# Altium footprint library PCB1.PcbLib: 53 footprints (part 1 of 4)
Each footprint in its own frame and in the unit in brackets; x right, y up, seen from the top. Pads: shape width x height; smd on the part's side, far side on the other; paste and mask are expansions set on the pad; w line width, h text height; cw(c..) or ccw(c..) is an arc to the next point about the centre after c.
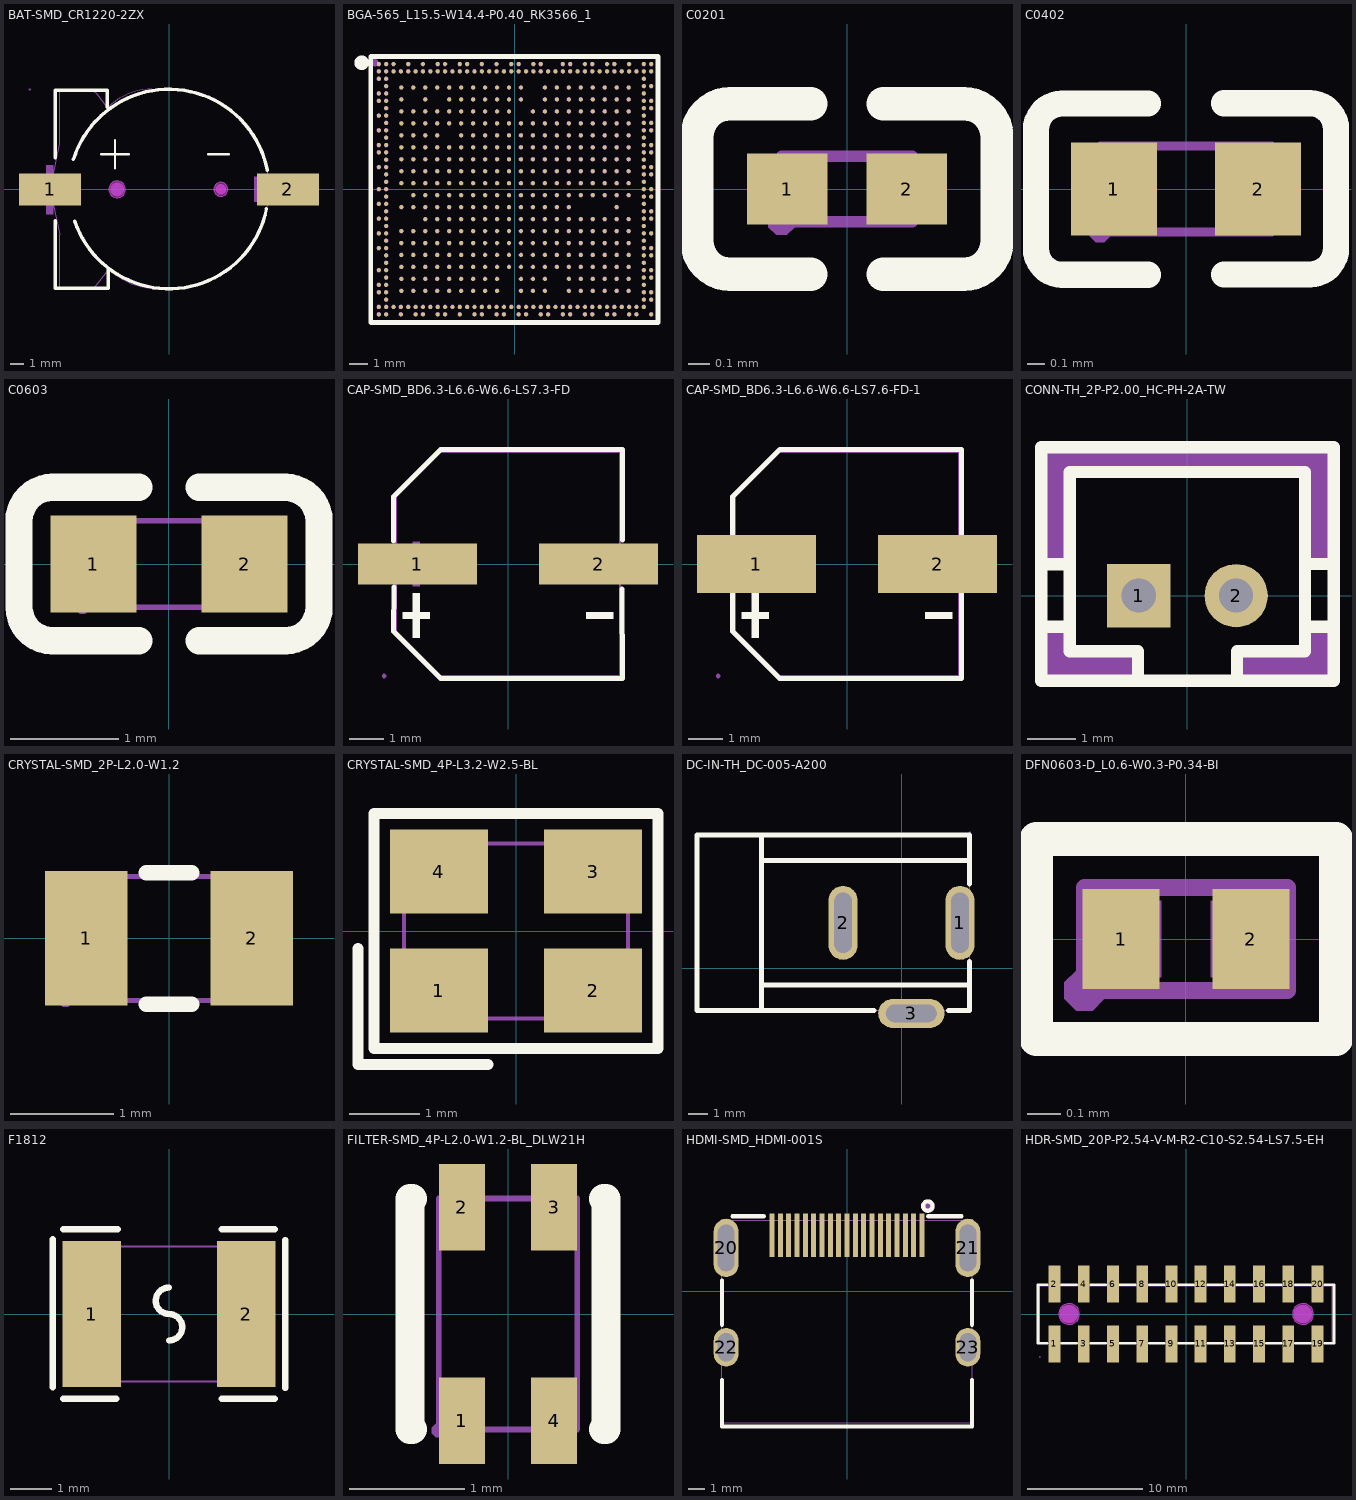
[diagram p0: the footprints below, top view; thin cyan lines are the x and y axes]

## BAT-SMD_CR1220-2ZX [mm]
pads (2):
  rect 4.5x2.3 smd: 1(-8.6,0) 2(8.6,0)
Top Overlay:
  lines w0.152: -4.928,2.54 -2.896,2.54 ; -3.912,1.524 -3.912,3.556 ; 2.819,2.54 4.343,2.54
  lines w0.254: -8.24,-2.26 -8.24,-7.15 -4.4,-7.15 -4.4,-5.706 -4.378,-5.706 ; -8.24,2.3 -8.24,7.17 -5.51,7.17 -4.47,7.17 -4.47,5.95 ; -6.911,2.175 cw(c0,0) 7.109,1.399 ; -6.815,-2.297 ccw(c0,0) 7.051,-1.418
Keep-Out Layer:
  board cut-out: 4.25,0 4.25,-0.099 4.174,-0.283 4.033,-0.424 3.85,-0.5 3.651,-0.5 3.467,-0.424 3.326,-0.283 3.25,-0.099 3.25,0 3.25,0.099 3.326,0.283 3.467,0.424 3.651,0.5 3.85,0.5 4.033,0.424 4.174,0.283 4.25,0.099 4.25,0
  board cut-out: -3.15,0 -3.15,-0.119 -3.241,-0.34 -3.41,-0.509 -3.631,-0.6 -3.869,-0.6 -4.09,-0.509 -4.259,-0.34 -4.35,-0.119 -4.35,0 -4.35,0.119 -4.259,0.34 -4.09,0.509 -3.869,0.6 -3.631,0.6 -3.41,0.509 -3.241,0.34 -3.15,0.119 -3.15,0
Keep-Out Layer:
  circle w0.003: c3.75,0 r0.5
  circle w0.003: c-3.75,0 r0.6
  region: 4.25,0 4.25,-0.099 4.174,-0.283 4.033,-0.424 3.85,-0.5 3.651,-0.5 3.467,-0.424 3.326,-0.283 3.25,-0.099 3.25,0 3.25,0.099 3.326,0.283 3.467,0.424 3.651,0.5 3.85,0.5 4.033,0.424 4.174,0.283 4.25,0.099 4.25,0
  region: 4.25,0 4.24,-0.098 4.212,-0.191 4.166,-0.278 4.104,-0.354 4.028,-0.416 3.941,-0.462 3.848,-0.49 3.75,-0.5 3.653,-0.49 3.559,-0.462 3.472,-0.416 3.397,-0.354 3.334,-0.278 3.288,-0.191 3.26,-0.098 3.25,0 3.26,0.098 3.288,0.191 3.334,0.278 3.397,0.354 3.472,0.416 3.559,0.462 3.653,0.49 3.75,0.5 3.848,0.49 3.941,0.462 4.028,0.416 4.104,0.354 4.166,0.278 4.212,0.191 4.24,0.098
  region: -3.15,0 -3.15,-0.119 -3.241,-0.34 -3.41,-0.509 -3.631,-0.6 -3.869,-0.6 -4.09,-0.509 -4.259,-0.34 -4.35,-0.119 -4.35,0 -4.35,0.119 -4.259,0.34 -4.09,0.509 -3.869,0.6 -3.631,0.6 -3.41,0.509 -3.241,0.34 -3.15,0.119 -3.15,0
  region: -3.15,0 -3.159,-0.104 -3.186,-0.205 -3.23,-0.3 -3.29,-0.386 -3.364,-0.46 -3.45,-0.52 -3.545,-0.564 -3.646,-0.591 -3.75,-0.6 -3.854,-0.591 -3.955,-0.564 -4.05,-0.52 -4.136,-0.46 -4.21,-0.386 -4.27,-0.3 -4.314,-0.205 -4.341,-0.104 -4.35,0 -4.341,0.104 -4.314,0.205 -4.27,0.3 -4.21,0.386 -4.136,0.46 -4.05,0.52 -3.955,0.564 -3.854,0.591 -3.75,0.6 -3.646,0.591 -3.545,0.564 -3.45,0.52 -3.364,0.46 -3.29,0.386 -3.23,0.3 -3.186,0.205 -3.159,0.104
Mechanical 1:
  circle w0.003: c3.75,0 r0.5
  circle w0.003: c-3.75,0 r0.6
Mechanical 6:
  drawing of 9 lines, arcs and shapes, not listed
Mechanical 7:
  lines w0.051: -8.382,-1.016 -8.382,1.016 -7.89,3.3 -7.89,7.15 -5.47,7.15 -5.2,6.88 -4.47,5.92 -4.43,5.92 cw(c-1.232,2.722) -1.232,7.245 0.081,7.245 cw(c0.081,0.08) 7.245,0.08 7.245,0 cw(c0.053,0) 0.053,-7.192 0,-7.192 -0.843,-7.192 cw(c-0.843,-2.281) -4.315,-5.754 -5.26,-6.93 -5.48,-7.15 -7.89,-7.15 -7.89,-3.3 -8.38,-1.07 -8.382,-1.016
Mechanical 8:
  region: -10.01,7.215 -10.01,7.19 -10.045,7.155 -10.095,7.155 -10.13,7.19 -10.13,7.215 -10.13,7.24 -10.095,7.275 -10.045,7.275 -10.01,7.24 -10.01,7.215
Mechanical 9:
  region: -6.57,-0.9 -10.07,-0.9 -10.07,0.9 -6.57,0.9
  region: 6.17,0.9 9.67,0.9 9.67,-0.9 6.17,-0.9
3D body "C7498147.step": height 4.05, standoff -0.85, extent -9.416,-7.45 10.34,7.45

## BGA-565_L15.5-W14.4-P0.40_RK3566_1 [mm]
pads (565):
  round 0.22 smd: 1A1(-6.175,5.525) 1A2(-5.525,5.525) 1A3(-4.875,5.525) 1A4(-4.225,5.525) 1A5(-3.575,5.525) 1A6(-2.925,5.525) 1A7(-2.275,5.525) 1A8(-1.625,5.525) 1A9(-0.975,5.525) 1A10(-0.325,5.525) 1A11(0.325,5.525) 1A13(1.625,5.525) 1A14(2.275,5.525) 1A15(2.925,5.525) 1A16(3.575,5.525) 1A17(4.225,5.525) 1A18(4.875,5.525) 1A19(5.525,5.525) 1A20(6.175,5.525) 1B1(-6.175,4.875) 1B3(-4.875,4.875) 1B5(-3.575,4.875) 1B6(-2.925,4.875) 1B7(-2.275,4.875) 1B8(-1.625,4.875) 1B9(-0.975,4.875) 1B10(-0.325,4.875) 1B11(0.325,4.875) 1B13(1.625,4.875) 1B14(2.275,4.875) 1B15(2.925,4.875) 1B16(3.575,4.875) 1B17(4.225,4.875) 1B18(4.875,4.875) 1B19(5.525,4.875) 1B20(6.175,4.875) 1C1(-6.175,4.225) 1C2(-5.525,4.225) 1C3(-4.875,4.225) 1C4(-4.225,4.225) 1C5(-3.575,4.225) 1C6(-2.925,4.225) 1C7(-2.275,4.225) 1C8(-1.625,4.225) 1C9(-0.975,4.225) 1C10(-0.325,4.225) 1C12(0.975,4.225) 1C13(1.625,4.225) 1C14(2.275,4.225) 1C15(2.925,4.225) 1C16(3.575,4.225) 1C17(4.225,4.225) 1C18(4.875,4.225) 1C19(5.525,4.225) 1C20(6.175,4.225) 1D1(-6.175,3.575) 1D2(-5.525,3.575) 1D3(-4.875,3.575) 1D4(-4.225,3.575) 1D5(-3.575,3.575) 1D6(-2.925,3.575) 1D7(-2.275,3.575) 1D8(-1.625,3.575) 1D9(-0.975,3.575) 1D10(-0.325,3.575) 1D11(0.325,3.575) 1D12(0.975,3.575) 1D13(1.625,3.575) 1D14(2.275,3.575) 1D15(2.925,3.575) 1D16(3.575,3.575) 1D17(4.225,3.575) 1D18(4.875,3.575) 1D19(5.525,3.575) 1D20(6.175,3.575) 1E1(-6.175,2.925) 1E2(-5.525,2.925) 1E3(-4.875,2.925) 1E4(-4.225,2.925) 1E6(-2.925,2.925) 1E7(-2.275,2.925) 1E8(-1.625,2.925) 1E9(-0.975,2.925) 1E10(-0.325,2.925) 1E11(0.325,2.925) 1E12(0.975,2.925) 1E13(1.625,2.925) 1E14(2.275,2.925) 1E15(2.925,2.925) 1E16(3.575,2.925) 1E17(4.225,2.925) 1E18(4.875,2.925) 1E19(5.525,2.925) 1E20(6.175,2.925) 1F1(-6.175,2.275) 1F2(-5.525,2.275) 1F3(-4.875,2.275) 1F4(-4.225,2.275) 1F5(-3.575,2.275) 1F6(-2.925,2.275) 1F7(-2.275,2.275) 1F8(-1.625,2.275) 1F9(-0.975,2.275) 1F10(-0.325,2.275) 1F11(0.325,2.275) 1F12(0.975,2.275) 1F13(1.625,2.275) 1F14(2.275,2.275) 1F15(2.925,2.275) 1F16(3.575,2.275) 1F17(4.225,2.275) 1F18(4.875,2.275) 1F19(5.525,2.275) 1F20(6.175,2.275) 1G1(-6.175,1.625) 1G2(-5.525,1.625) 1G3(-4.875,1.625) 1G4(-4.225,1.625) 1G5(-3.575,1.625) 1G6(-2.925,1.625) 1G7(-2.275,1.625) 1G8(-1.625,1.625) 1G9(-0.975,1.625) 1G10(-0.325,1.625) 1G11(0.325,1.625) 1G12(0.975,1.625) 1G13(1.625,1.625) 1G14(2.275,1.625) 1G15(2.925,1.625) 1G16(3.575,1.625) 1G17(4.225,1.625) 1G18(4.875,1.625) 1G19(5.525,1.625) 1G20(6.175,1.625) 1H1(-6.175,0.975) 1H2(-5.525,0.975) 1H3(-4.875,0.975) 1H4(-4.225,0.975) 1H5(-3.575,0.975) 1H6(-2.925,0.975) 1H7(-2.275,0.975) 1H8(-1.625,0.975) 1H9(-0.975,0.975) 1H10(-0.325,0.975) 1H11(0.325,0.975) 1H12(0.975,0.975) 1H13(1.625,0.975) 1H14(2.275,0.975) 1H15(2.925,0.975) 1H16(3.575,0.975) 1H17(4.225,0.975) 1H18(4.875,0.975) 1H19(5.525,0.975) 1H20(6.175,0.975) 1J1(-6.175,0.325) 1J2(-5.525,0.325) 1J3(-4.875,0.325) 1J4(-4.225,0.325) 1J5(-3.575,0.325) 1J6(-2.925,0.325) 1J7(-2.275,0.325) 1J8(-1.625,0.325) 1J9(-0.975,0.325) 1J10(-0.325,0.325) 1J11(0.325,0.325) 1J12(0.975,0.325) 1J13(1.625,0.325) 1J14(2.275,0.325) 1J15(2.925,0.325) 1J16(3.575,0.325) 1J17(4.225,0.325) 1J18(4.875,0.325) 1J19(5.525,0.325) 1J20(6.175,0.325) 1K2(-5.525,-0.325) 1K3(-4.875,-0.325) 1K4(-4.225,-0.325) 1K5(-3.575,-0.325) 1K6(-2.925,-0.325) 1K7(-2.275,-0.325) 1K8(-1.625,-0.325) 1K9(-0.975,-0.325) 1K10(-0.325,-0.325) 1K11(0.325,-0.325) 1K12(0.975,-0.325) 1K13(1.625,-0.325) 1K14(2.275,-0.325) 1K15(2.925,-0.325) 1K16(3.575,-0.325) 1K17(4.225,-0.325) 1K18(4.875,-0.325) 1K19(5.525,-0.325) 1K20(6.175,-0.325) 1L1(-6.175,-0.975) 1L2(-5.525,-0.975) 1L3(-4.875,-0.975) 1L4(-4.225,-0.975) 1L5(-3.575,-0.975) 1L6(-2.925,-0.975) 1L7(-2.275,-0.975) 1L8(-1.625,-0.975) 1L9(-0.975,-0.975) 1L10(-0.325,-0.975) 1L11(0.325,-0.975) 1L12(0.975,-0.975) 1L13(1.625,-0.975) 1L14(2.275,-0.975) 1L15(2.925,-0.975) 1L19(5.525,-0.975) 1M3(-4.875,-1.625) 1M4(-4.225,-1.625) 1M5(-3.575,-1.625) 1M6(-2.925,-1.625) 1M7(-2.275,-1.625) 1M8(-1.625,-1.625) 1M9(-0.975,-1.625) 1M10(-0.325,-1.625) 1M11(0.325,-1.625) 1M12(0.975,-1.625) 1M13(1.625,-1.625) 1M14(2.275,-1.625) 1M15(2.925,-1.625) 1M16(3.575,-1.625) 1M17(4.225,-1.625) 1M18(4.875,-1.625) 1M19(5.525,-1.625) 1M20(6.175,-1.625) 1N1(-6.175,-2.275) 1N2(-5.525,-2.275) 1N3(-4.875,-2.275) 1N4(-4.225,-2.275) 1N5(-3.575,-2.275) 1N6(-2.925,-2.275) 1N7(-2.275,-2.275) 1N8(-1.625,-2.275) 1N9(-0.975,-2.275) 1N10(-0.325,-2.275) 1N11(0.325,-2.275) 1N12(0.975,-2.275) 1N13(1.625,-2.275) 1N14(2.275,-2.275) 1N15(2.925,-2.275) 1N16(3.575,-2.275) 1N17(4.225,-2.275) 1N18(4.875,-2.275) 1N19(5.525,-2.275) 1N20(6.175,-2.275) 1P1(-6.175,-2.925) 1P2(-5.525,-2.925) 1P3(-4.875,-2.925) 1P4(-4.225,-2.925) 1P5(-3.575,-2.925) 1P6(-2.925,-2.925) 1P7(-2.275,-2.925) 1P8(-1.625,-2.925) 1P9(-0.975,-2.925) 1P10(-0.325,-2.925) 1P11(0.325,-2.925) 1P12(0.975,-2.925) 1P13(1.625,-2.925) 1P14(2.275,-2.925) 1P15(2.925,-2.925) 1P16(3.575,-2.925) 1P17(4.225,-2.925) 1P18(4.875,-2.925) 1P19(5.525,-2.925) 1P20(6.175,-2.925) 1R1(-6.175,-3.575) 1R2(-5.525,-3.575) 1R3(-4.875,-3.575) 1R4(-4.225,-3.575) 1R5(-3.575,-3.575) 1R6(-2.925,-3.575) 1R7(-2.275,-3.575) 1R8(-1.625,-3.575) 1R9(-0.975,-3.575) 1R10(-0.325,-3.575) 1R11(0.325,-3.575) 1R12(0.975,-3.575) 1R13(1.625,-3.575) 1R14(2.275,-3.575) 1R15(2.925,-3.575) 1R16(3.575,-3.575) 1R17(4.225,-3.575) 1R18(4.875,-3.575) 1R19(5.525,-3.575) 1R20(6.175,-3.575) 1T1(-6.175,-4.225) 1T2(-5.525,-4.225) 1T3(-4.875,-4.225) 1T4(-4.225,-4.225) 1T5(-3.575,-4.225) 1T6(-2.925,-4.225) 1T7(-2.275,-4.225) 1T8(-1.625,-4.225) 1T9(-0.975,-4.225) 1T10(-0.325,-4.225) 1T11(0.325,-4.225) 1T12(0.975,-4.225) 1T13(1.625,-4.225) 1T14(2.275,-4.225) 1T15(2.925,-4.225) 1T16(3.575,-4.225) 1T17(4.225,-4.225) 1T18(4.875,-4.225) 1T19(5.525,-4.225) 1T20(6.175,-4.225) 1U1(-6.175,-4.875) 1U2(-5.525,-4.875) 1U3(-4.875,-4.875) 1U4(-4.225,-4.875) 1U5(-3.575,-4.875) 1U6(-2.925,-4.875) 1U7(-2.275,-4.875) 1U8(-1.625,-4.875) 1U9(-0.975,-4.875) 1U11(0.325,-4.875) 1U12(0.975,-4.875) 1U13(1.625,-4.875) 1U15(2.925,-4.875) 1U16(3.575,-4.875) 1U17(4.225,-4.875) 1U18(4.875,-4.875) 1U19(5.525,-4.875) 1U20(6.175,-4.875) 1V1(-6.175,-5.525) 1V2(-5.525,-5.525) 1V3(-4.875,-5.525) 1V4(-4.225,-5.525) 1V5(-3.575,-5.525) 1V6(-2.925,-5.525) 1V7(-2.275,-5.525) 1V8(-1.625,-5.525) 1V9(-0.975,-5.525) 1V11(0.325,-5.525) 1V12(0.975,-5.525) 1V13(1.625,-5.525) 1V15(2.925,-5.525) 1V16(3.575,-5.525) 1V17(4.225,-5.525) 1V18(4.875,-5.525) 1V19(5.525,-5.525) 1V20(6.175,-5.525)
  round 0.22 smd paste+0 mask+0.038: A1(-7.4,6.8) A2(-7,6.8) A3(-6.6,6.8) A5(-5.8,6.8) A7(-5,6.8) A9(-4.2,6.8) A10(-3.8,6.8) A12(-3,6.8) A13(-2.6,6.8) A15(-1.8,6.8) A17(-1,6.8) A19(-0.2,6.8) A20(0.2,6.8) A22(1,6.8) A23(1.4,6.8) A26(2.6,6.8) A27(3,6.8) A29(3.8,6.8) A30(4.2,6.8) A32(5,6.8) A33(5.4,6.8) A35(6.2,6.8) A37(7,6.8) A38(7.4,6.8) AA2(-7,-1.2) AA37(7,-1.2) AA38(7.4,-1.2) AB1(-7.4,-1.6) AB2(-7,-1.6) AB37(7,-1.6) AB38(7.4,-1.6) AC2(-7,-2) AC37(7,-2) AD1(-7.4,-2.4) AD2(-7,-2.4) AD37(7,-2.4) AD38(7.4,-2.4) AE2(-7,-2.8) AE37(7,-2.8) AF1(-7.4,-3.2) AF2(-7,-3.2) AF37(7,-3.2) AF38(7.4,-3.2) AG2(-7,-3.6) AG37(7,-3.6) AG38(7.4,-3.6) AH2(-7,-4) AH37(7,-4) AJ1(-7.4,-4.4) AJ2(-7,-4.4) AJ37(7,-4.4) AJ38(7.4,-4.4) AK2(-7,-4.8) AK38(7.4,-4.8) AL1(-7.4,-5.2) AL2(-7,-5.2) AL37(7,-5.2) AM1(-7.4,-5.6) AM2(-7,-5.6) AM37(7,-5.6) AM38(7.4,-5.6) AN2(-7,-6) AN37(7,-6) AN38(7.4,-6) AP1(-7.4,-6.4) AP2(-7,-6.4) AP3(-6.6,-6.4) AP4(-6.2,-6.4) AP5(-5.8,-6.4) AP6(-5.4,-6.4) AP7(-5,-6.4) AP8(-4.6,-6.4) AP9(-4.2,-6.4) AP10(-3.8,-6.4) AP11(-3.4,-6.4) AP12(-3,-6.4) AP13(-2.6,-6.4) AP14(-2.2,-6.4) AP15(-1.8,-6.4) AP16(-1.4,-6.4) AP17(-1,-6.4) AP18(-0.6,-6.4) AP19(-0.2,-6.4) AP20(0.2,-6.4) AP21(0.6,-6.4) AP22(1,-6.4) AP23(1.4,-6.4) AP24(1.8,-6.4) AP25(2.2,-6.4) AP26(2.6,-6.4) AP27(3,-6.4) AP28(3.4,-6.4) AP29(3.8,-6.4) AP30(4.2,-6.4) AP31(4.6,-6.4) AP32(5,-6.4) AP33(5.4,-6.4) AP34(5.8,-6.4) AP35(6.2,-6.4) AP36(6.6,-6.4) AP37(7,-6.4) AR1(-7.4,-6.8) AR2(-7,-6.8) AR4(-6.2,-6.8) AR6(-5.4,-6.8) AR7(-5,-6.8) AR9(-4.2,-6.8) AR10(-3.8,-6.8) AR12(-3,-6.8) AR14(-2.2,-6.8) AR15(-1.8,-6.8) AR17(-1,-6.8) AR18(-0.6,-6.8) AR20(0.2,-6.8) AR21(0.6,-6.8) AR23(1.4,-6.8) AR24(1.8,-6.8) AR26(2.6,-6.8) AR27(3,-6.8) AR29(3.8,-6.8) AR30(4.2,-6.8) AR32(5,-6.8) AR33(5.4,-6.8) AR35(6.2,-6.8) AR36(6.6,-6.8) AR38(7.4,-6.8) B1(-7.4,6.4) B2(-7,6.4) B3(-6.6,6.4) B4(-6.2,6.4) B5(-5.8,6.4) B6(-5.4,6.4) B7(-5,6.4) B8(-4.6,6.4) B9(-4.2,6.4) B10(-3.8,6.4) B11(-3.4,6.4) B12(-3,6.4) B13(-2.6,6.4) B14(-2.2,6.4) B15(-1.8,6.4) B16(-1.4,6.4) B17(-1,6.4) B18(-0.6,6.4) B19(-0.2,6.4) B20(0.2,6.4) B21(0.6,6.4) B22(1,6.4) B23(1.4,6.4) B24(1.8,6.4) B25(2.2,6.4) B26(2.6,6.4) B27(3,6.4) B28(3.4,6.4) B29(3.8,6.4) B30(4.2,6.4) B31(4.6,6.4) B32(5,6.4) B33(5.4,6.4) B34(5.8,6.4) B35(6.2,6.4) B36(6.6,6.4) B37(7,6.4) B38(7.4,6.4) C1(-7.4,6) C2(-7,6) C37(7,6) D2(-7,5.6) D37(7,5.6) D38(7.4,5.6) E1(-7.4,5.2) E2(-7,5.2) E37(7,5.2) F1(-7.4,4.8) F2(-7,4.8) F37(7,4.8) F38(7.4,4.8) G2(-7,4.4) G37(7,4.4) G38(7.4,4.4) H1(-7.4,4) H2(-7,4) H37(7,4) J2(-7,3.6) J37(7,3.6) J38(7.4,3.6) K1(-7.4,3.2) K2(-7,3.2) K37(7,3.2) K38(7.4,3.2) L2(-7,2.8) L37(7,2.8) M1(-7.4,2.4) M2(-7,2.4) M37(7,2.4) M38(7.4,2.4) N1(-7.4,2) N2(-7,2) N37(7,2) N38(7.4,2) P2(-7,1.6) P37(7,1.6) R1(-7.4,1.2) R2(-7,1.2) R37(7,1.2) R38(7.4,1.2) T2(-7,0.8) T37(7,0.8) T38(7.4,0.8) U2(-7,0.4) U37(7,0.4) V1(-7.4,0) V2(-7,0) V37(7,0) V38(7.4,0) W2(-7,-0.4) W37(7,-0.4) W38(7.4,-0.4) Y1(-7.4,-0.8) Y2(-7,-0.8) Y37(7,-0.8)
  round 0.22 smd paste-2539.97 mask+0.038: AK37(7,-4.8)
Top Overlay:
  circle w0.4: c-8.33,6.87 r0.2
  lines w0.254: -7.83,-7.24 7.77,-7.24 7.77,7.21 -7.83,7.21 -7.83,-7.24
Top Paste:
  circle w0.11: c7,-4.8 r0.055
Mechanical 6:
  circle w0.2: c-7.61,6.87 r0.1
Mechanical 7:
  lines w0.051: -7.75,-7.2 7.75,-7.2 7.75,7.2 -7.75,7.2 -7.75,-7.2
Mechanical 8:
  region: -7.707,7.158 -7.725,7.14 -7.775,7.14 -7.81,7.175 -7.81,7.225 -7.792,7.243 -7.775,7.26 -7.725,7.26 -7.69,7.225 -7.69,7.175 -7.707,7.158
Mechanical 9:
  drawing of 565 lines, arcs and shapes, not listed
3D body "C2943786.step": height 0.46, standoff -0.31, extent -7.75,-7.2 7.75,7.2

## C0201 [mm]
pads (2):
  rect 0.368x0.324 smd paste-100 mask+0.051: 1(-0.274,0) 2(0.274,0)
Top Overlay:
  lines w0.152: -0.166,-0.391 -0.535,-0.391 cw(c-0.535,-0.238) -0.687,-0.238 -0.687,0.238 cw(c-0.535,0.238) -0.535,0.391 -0.166,0.391 ; 0.166,-0.391 0.535,-0.391 ccw(c0.535,-0.238) 0.687,-0.238 0.687,0.238 ccw(c0.535,0.238) 0.535,0.391 0.166,0.391
Top Paste:
  region: -0.081,-0.138 -0.081,0.138 -0.105,0.162 -0.434,0.162 -0.458,0.138 -0.458,-0.138 -0.434,-0.162 -0.105,-0.162
  region: 0.081,-0.138 0.081,0.138 0.105,0.162 0.434,0.162 0.458,0.138 0.458,-0.138 0.434,-0.162 0.105,-0.162
Mechanical 7:
  lines w0.051: -0.3,-0.15 0.3,-0.15 0.3,0.15 -0.3,0.15 -0.3,-0.15
Mechanical 8:
  region: -0.24,-0.15 -0.24,-0.175 -0.275,-0.21 -0.325,-0.21 -0.36,-0.175 -0.36,-0.15 -0.36,-0.125 -0.325,-0.09 -0.275,-0.09 -0.24,-0.125 -0.24,-0.15
Mechanical 9:
  region: 0.3,-0.15 0.3,0.15 0.15,0.15 0.15,-0.15
  region: -0.3,-0.15 -0.3,0.15 -0.15,0.15 -0.15,-0.15
3D body "C76939.step": height 0.16, standoff -0.15, extent -0.3,-0.15 0.3,0.15

## C0402 [mm]
pads (2):
  rect 0.5x0.54 smd: 1(-0.42,0) 2(0.42,0)
Top Overlay:
  lines w0.152: -0.221,-0.5 -0.721,-0.5 cw(c-0.721,-0.347) -0.874,-0.347 -0.874,0.345 cw(c-0.721,0.345) -0.721,0.498 -0.221,0.498 ; 0.221,-0.498 0.721,-0.498 ccw(c0.721,-0.345) 0.874,-0.345 0.874,0.347 ccw(c0.721,0.347) 0.721,0.5 0.221,0.5
Mechanical 7:
  lines w0.051: -0.5,-0.25 0.5,-0.25 0.5,0.25 -0.5,0.25 -0.5,-0.25
Mechanical 8:
  region: -0.44,-0.25 -0.44,-0.275 -0.475,-0.31 -0.525,-0.31 -0.56,-0.275 -0.56,-0.25 -0.56,-0.225 -0.525,-0.19 -0.475,-0.19 -0.44,-0.225 -0.44,-0.25
Mechanical 9:
  region: 0.5,-0.25 0.5,0.25 0.25,0.25 0.25,-0.25
  region: -0.5,-0.25 -0.5,0.25 -0.25,0.25 -0.25,-0.25
3D body "C1525.step": height 0.25, standoff -0.25, extent -0.5,-0.25 0.5,0.25

## C0603 [mm]
pads (2):
  rect 0.8x0.9 smd: 1(-0.7,0) 2(0.7,0)
Top Overlay:
  lines w0.254: -1.08,-0.71 -0.28,-0.71 ; -1.08,0.71 -0.28,0.71 ; -1.08,-0.71 cw(c-1.08,-0.4) -1.39,-0.4 -1.39,0.4 cw(c-1.08,0.4) -1.08,0.71 ; 0.28,-0.71 1.08,-0.71 ccw(c1.08,-0.4) 1.39,-0.4 1.39,0.4 ccw(c1.08,0.4) 1.08,0.71 0.28,0.71
Mechanical 7:
  lines w0.051: -0.8,-0.4 -0.8,0.4 0.8,0.4 0.8,-0.4 -0.8,-0.4
Mechanical 8:
  region: -0.8,-0.34 -0.775,-0.34 -0.74,-0.375 -0.74,-0.425 -0.775,-0.46 -0.8,-0.46 -0.825,-0.46 -0.86,-0.425 -0.86,-0.375 -0.825,-0.34 -0.8,-0.34
Mechanical 9:
  region: -0.8,-0.4 -0.8,0.4 -0.5,0.4 -0.5,-0.4
  region: 0.8,-0.4 0.8,0.4 0.5,0.4 0.5,-0.4
3D body "C7432770.step": height 0.4, standoff -0.4, extent -0.8,-0.4 0.8,0.4

## CAP-SMD_BD6.3-L6.6-W6.6-LS7.3-FD [mm]
pads (2):
  rect 3.5x1.2 smd: 1(-2.67,0) 2(2.67,0)
Top Overlay:
  region: -2.805,-0.858 -2.805,-2.178 -2.607,-2.178 -2.607,-0.858
  region: -3.102,-1.419 -3.102,-1.617 -2.31,-1.617 -2.31,-1.419
  region: 3.102,-1.419 3.102,-1.617 2.31,-1.617 2.31,-1.419
  lines w0.152: -3.376,0.686 -3.376,1.98 -1.98,3.376 3.376,3.376 3.369,0.708 ; -3.362,-0.686 -3.376,-1.981 -1.981,-3.376 3.376,-3.376 3.356,-0.739
Mechanical 6:
  region: -2.805,0.66 -2.805,-0.66 -2.607,-0.66 -2.607,0.66
  region: -3.102,0.099 -3.102,-0.099 -2.31,-0.099 -2.31,0.099
  region: 3.102,0.099 3.102,-0.099 2.31,-0.099 2.31,0.099
Mechanical 7:
  lines w0.051: -3.3,-1.98 -1.98,-3.3 3.3,-3.3 3.3,3.3 -1.98,3.3 -3.3,1.98 -3.3,-1.98
Mechanical 8:
  region: -3.592,-3.3 -3.592,-3.325 -3.627,-3.36 -3.676,-3.36 -3.712,-3.325 -3.712,-3.3 -3.712,-3.275 -3.676,-3.24 -3.627,-3.24 -3.592,-3.275 -3.592,-3.3
Mechanical 9:
  region: 0.999,0.35 3.649,0.35 3.649,-0.35 0.999,-0.35
  region: -3.652,0.35 -1.002,0.35 -1.002,-0.35 -3.652,-0.35
3D body "C46550464.step": height 5.8, standoff -0.02, extent -3.65,-3.301 3.65,3.3

## CAP-SMD_BD6.3-L6.6-W6.6-LS7.6-FD-1 [mm]
pads (2):
  rect 3.5x1.7 smd: 1(-2.67,0) 2(2.67,0)
Top Overlay:
  region: -2.805,-0.858 -2.805,-2.178 -2.607,-2.178 -2.607,-0.858
  region: -3.102,-1.419 -3.102,-1.617 -2.31,-1.617 -2.31,-1.419
  region: 3.102,-1.419 3.102,-1.617 2.31,-1.617 2.31,-1.419
  lines w0.152: -3.376,-0.78 -3.376,-1.981 -1.981,-3.376 3.376,-3.376 3.375,-0.78 ; -3.376,0.78 -3.376,1.12 -3.376,1.981 -1.979,3.376 3.375,3.376 3.375,0.78
Mechanical 6:
  region: -2.805,0.66 -2.805,-0.66 -2.607,-0.66 -2.607,0.66
  region: -3.102,0.099 -3.102,-0.099 -2.31,-0.099 -2.31,0.099
  region: 3.102,0.099 3.102,-0.099 2.31,-0.099 2.31,0.099
Mechanical 7:
  lines w0.051: -3.3,-1.98 -3.3,1.98 -1.98,3.3 3.3,3.3 3.3,-3.3 -1.98,-3.3 -3.3,-1.98
Mechanical 8:
  region: -3.86,-3.3 -3.86,-3.275 -3.825,-3.24 -3.775,-3.24 -3.74,-3.275 -3.74,-3.3 -3.74,-3.325 -3.775,-3.36 -3.825,-3.36 -3.86,-3.325 -3.86,-3.3
Mechanical 9:
  region: 1.25,0.475 3.8,0.475 3.8,-0.475 1.25,-0.475
  region: -3.8,0.475 -1.25,0.475 -1.25,-0.475 -3.8,-0.475
3D body "C46550464.step": height 5.8, standoff -0.02, extent -3.65,-3.301 3.65,3.3

## CONN-TH_2P-P2.00_HC-PH-2A-TW [mm]
pads (2):
  rect 1.3x1.3 hole 0.7 paste-2539.97 mask+0.05: 1(-1,0)
  round 1.3 hole 0.7 paste-2539.97 mask+0.05: 2(1,0)
Top Overlay:
  lines w0.254: -3,-0.636 -2.414,-0.636 ; -3,0.646 -2.414,0.646 ; -2.41,3.05 2.4,3.05 ; -1.016,-1.651 -1.016,-1.143 -2.414,-1.143 -2.414,2.54 2.414,2.54 2.414,-1.143 1.016,-1.143 1.016,-1.75 ; 2.414,-0.638 3,-0.638 ; 2.414,0.65 3,0.65 ; -3,-1.75 3,-1.75 3,3.05 -3,3.05 -3,-1.75
Mechanical 6:
  region: 1.05,-1.75 3,-1.75 3,-0.65 2.4,-0.65 2.4,-1.15 1.05,-1.15
  region: 2.4,0.65 3,0.65 3,3.05 -3,3.05 -3,0.65 -2.4,0.65 -2.4,2.55 2.4,2.55
  region: -1,-1.15 -1,-1.75 -3,-1.75 -3,-0.65 -2.4,-0.65 -2.4,-1.15
Mechanical 7:
  lines w0.051: -3.05,-1.65 -3.05,3.05 3.05,3.05 3.05,-1.65 -3.05,-1.65
Mechanical 8:
  region: -2.99,-1.65 -2.99,-1.675 -3.025,-1.71 -3.075,-1.71 -3.11,-1.675 -3.11,-1.65 -3.11,-1.625 -3.075,-1.59 -3.025,-1.59 -2.99,-1.625 -2.99,-1.65
Mechanical 9:
  region: 0.75,0.25 1.25,0.25 1.25,-0.25 0.75,-0.25
  region: -1.25,0.25 -0.75,0.25 -0.75,-0.25 -1.25,-0.25
3D body "C54905988.step": height 6.03, standoff -3.47, extent -2.952,-1.778 3.048,3.032

## CRYSTAL-SMD_2P-L2.0-W1.2 [mm]
pads (2):
  rect 0.8x1.3 smd: 1(-0.8,0) 2(0.8,0)
Top Overlay:
  lines w0.152: -0.22,-0.635 0.22,-0.635 ; -0.22,0.635 0.22,0.635
Mechanical 7:
  lines w0.051: -1,-0.6 1,-0.6 1,0.6 -1,0.6 -1,-0.6
Mechanical 8:
  region: -0.94,-0.6 -0.94,-0.625 -0.975,-0.66 -1.025,-0.66 -1.06,-0.625 -1.06,-0.6 -1.06,-0.575 -1.025,-0.54 -0.975,-0.54 -0.94,-0.575 -0.94,-0.6
Mechanical 9:
  region: -1,0.6 -0.5,0.6 -0.5,-0.6 -1,-0.6
  region: 0.5,0.6 1,0.6 1,-0.6 0.5,-0.6
3D body "C7500573.step": height 0.56, standoff -0.01, extent -1,-0.6 1,0.6

## CRYSTAL-SMD_4P-L3.2-W2.5-BL [mm]
pads (4):
  rect 1.4x1.2 smd: 1(-1.1,-0.85) 2(1.1,-0.85) 3(1.1,0.85) 4(-1.1,0.85)
Top Overlay:
  lines w0.152: -2.257,-0.25 -2.257,-1.907 -0.4,-1.907 ; -2.029,-1.678 -2.029,1.679 2.029,1.679 2.029,-1.678 -2.029,-1.678
Mechanical 6:
  circle w0.254: c-1.27,-0.889 r0.127
Mechanical 7:
  lines w0.051: -1.6,-1.25 -1.6,1.25 1.6,1.25 1.6,-1.25 -1.6,-1.25
Mechanical 8:
  region: -1.54,-1.25 -1.54,-1.275 -1.575,-1.31 -1.625,-1.31 -1.66,-1.275 -1.66,-1.25 -1.66,-1.225 -1.625,-1.19 -1.575,-1.19 -1.54,-1.225 -1.54,-1.25
Mechanical 9:
  region: -1.5,1.15 -0.6,1.15 -0.6,0.35 -1.5,0.35
  region: 0.6,1.15 1.5,1.15 1.5,0.35 0.6,0.35
  region: 0.6,-0.35 1.5,-0.35 1.5,-1.15 0.6,-1.15
  region: -1.5,-0.35 -0.6,-0.35 -0.6,-1.15 -1.5,-1.15
3D body "C9006.step": height 0.7, standoff 0, extent -1.6,-1.25 1.6,1.25

## DC-IN-TH_DC-005-A200 [mm]
pads (3):
  oval 1.5x3.8 hole 0.9 slot 3.1 at 90 deg copper offset -0.001,0: 1(3.001,2.325)
  oval 1.5x3.8 hole 0.9 slot 3.1 at 90 deg copper offset 0,0: 2(-3,2.325)
  oval 3.4x1.5 hole 0.9 slot 2.6 at 0 deg copper offset 0,-0.001: 3(0.5,-2.325)
Top Overlay:
  lines w0.254: -7.2,-2.174 -7.2,6.826 ; -7.12,-0.874 3.5,-0.874 ; -7.12,5.525 3.5,5.525 ; -1.419,-2.174 -10.5,-2.174 -10.5,6.826 3.5,6.826 3.5,4.319 ; 2.42,-2.174 3.5,-2.174 3.5,0.332
Mechanical 7:
  lines w0.051: -10.5,-2.175 3.5,-2.175 3.5,6.825 -10.5,6.825 -10.5,-2.175
Mechanical 8:
  region: 3.56,6.952 3.56,6.928 3.525,6.893 3.475,6.893 3.44,6.928 3.44,6.952 3.44,6.977 3.475,7.012 3.525,7.012 3.56,6.977 3.56,6.952
Mechanical 9:
  region: 2.64,1.225 2.64,3.426 3.36,3.426 3.36,1.225
  region: -2.64,3.426 -2.64,1.225 -3.36,1.225 -3.36,3.426
  region: -0.35,-1.964 1.35,-1.964 1.35,-2.685 -0.35,-2.685
3D body "C720557.step": height 11, standoff -4.1, extent -10.494,-2.516 3.556,6.834

## DFN0603-D_L0.6-W0.3-P0.34-BI [mm]
pads (2):
  rect 0.23x0.3 smd paste+0 mask+0.05: 1(-0.195,0) 2(0.195,0)
Top Overlay:
  lines w0.102: -0.45,-0.3 -0.45,0.3 0.45,0.3 0.45,-0.3 -0.45,-0.3
Mechanical 7:
  lines w0.051: -0.305,-0.155 0.305,-0.155 0.305,0.155 -0.305,0.155 -0.305,-0.155
Mechanical 8:
  region: -0.245,-0.155 -0.245,-0.18 -0.28,-0.215 -0.33,-0.215 -0.365,-0.18 -0.365,-0.155 -0.365,-0.13 -0.33,-0.095 -0.28,-0.095 -0.245,-0.13 -0.245,-0.155
Mechanical 9:
  region: 0.265,0.115 0.265,-0.115 0.075,-0.115 0.075,0.115
  region: -0.075,0.115 -0.075,-0.115 -0.265,-0.115 -0.265,0.115
3D body "C152032.step": height 0.28, standoff -0.01, extent -0.305,-0.156 0.305,0.155

## F1812 [mm]
pads (2):
  rect 1.407x3.499 smd paste-100 mask+0.051: 1(-1.853,0) 2(1.853,0)
Top Overlay:
  lines w0.152: -2.794,-1.758 -2.794,1.798 ; -2.54,-2.032 -1.27,-2.032 ; -2.54,2.032 -1.235,2.032 ; 0,-0.635 ccw(c0,-0.318) 0,0 cw(c0,0.318) 0,0.635 ; 1.27,-2.032 2.54,-2.032 ; 1.27,2.032 2.54,2.032 ; 2.794,-1.778 2.794,1.778
Top Paste:
  region: -1.15,-1.65 -1.15,-0.695 -1.25,-0.595 -1.528,-0.595 -1.628,-0.495 -1.628,0.495 -1.528,0.595 -1.25,0.595 -1.15,0.695 -1.15,1.65 -1.25,1.75 -2.457,1.75 -2.557,1.65 -2.557,-1.65 -2.457,-1.75 -1.25,-1.75
  region: 1.15,-1.65 1.15,-0.695 1.25,-0.595 1.528,-0.595 1.628,-0.495 1.628,0.495 1.528,0.595 1.25,0.595 1.15,0.695 1.15,1.65 1.25,1.75 2.457,1.75 2.557,1.65 2.557,-1.65 2.457,-1.75 1.25,-1.75
Mechanical 7:
  lines w0.051: -2.275,-1.62 2.275,-1.62 2.275,1.62 -2.275,1.62 -2.275,-1.62
Mechanical 8:
  region: -2.215,-1.62 -2.215,-1.645 -2.25,-1.68 -2.3,-1.68 -2.335,-1.645 -2.335,-1.62 -2.335,-1.595 -2.3,-1.56 -2.25,-1.56 -2.215,-1.595 -2.215,-1.62
Mechanical 9:
  region: 2.275,-1.62 2.275,1.62 1.525,1.62 1.525,-1.62
  region: -2.275,-1.62 -2.275,1.62 -1.525,1.62 -1.525,-1.62
3D body "C7433877.step": height 1.04, standoff 0, extent -2.25,-1.6 2.25,1.6

## FILTER-SMD_4P-L2.0-W1.2-BL_DLW21H [mm]
pads (4):
  rect 0.4x0.75 smd: 1(-0.4,-0.925) 2(-0.4,0.925) 3(0.4,0.925) 4(0.4,-0.925)
Top Overlay:
  lines w0.254: -0.831,-1 -0.85,-1 -0.85,1 -0.831,1 ; 0.831,-1 0.85,-1 0.85,1 0.831,1
Mechanical 7:
  lines w0.051: -0.6,-1 -0.6,1 0.6,1 0.6,-1 -0.6,-1
Mechanical 8:
  region: -0.6,-1.07 -0.625,-1.07 -0.66,-1.035 -0.66,-0.985 -0.625,-0.95 -0.6,-0.95 -0.575,-0.95 -0.54,-0.985 -0.54,-1.035 -0.575,-1.07 -0.6,-1.07
Mechanical 9:
  region: -0.2,-0.56 -0.2,-1.01 -0.6,-1.01 -0.6,-0.56
  region: 0.6,-0.56 0.6,-1.01 0.2,-1.01 0.2,-0.56
  region: 0.6,1.01 0.6,0.56 0.2,0.56 0.2,1.01
  region: -0.2,1.01 -0.2,0.56 -0.6,0.56 -0.6,1.01
3D body "C97856.step": height 1.2, standoff 0, extent -0.6,-1.01 0.6,1.01

## HDMI-SMD_HDMI-001S [mm]
pads (23):
  rect 0.3x2.6 smd paste-100 mask+0.051: 1(4.5,3.36) 2(4,3.36) 3(3.5,3.36) 4(3,3.36) 5(2.5,3.36) 6(2,3.36) 7(1.5,3.36) 8(1,3.36) 9(0.5,3.36) 10(0,3.36) 11(-0.5,3.36) 12(-1,3.36) 13(-1.5,3.36) 14(-2,3.36) 15(-2.5,3.36) 16(-3,3.36) 17(-3.5,3.36) 18(-4,3.36) 19(-4.5,3.36)
  oval 1.5x3.5 hole 1 slot 2.8 at 90 deg: 20(-7.25,2.6) 21(7.25,2.6)
  oval 1.5x2.3 hole 1 slot 1.7 at 90 deg: 22(-7.25,-3.36) 23(7.25,-3.36)
Top Overlay:
  circle w0.254: c4.85,5.11 r0.28
  lines w0.254: -7.5,-5.33 -7.5,-8.121 7.5,-8.121 7.5,-5.33 ; -7.5,-2.011 -7.5,0.651 ; -6.863,4.5 -5,4.5 ; 4.881,4.5 6.863,4.5 ; 7.5,-2.011 7.5,0.651
Top Paste:
  drawing of 23 lines, arcs and shapes, not listed
Mechanical 6:
  circle w0.4: c4.85,5.11 r0.2
Mechanical 7:
  lines w0.051: -7.5,-7.9 -7.5,4.25 7.5,4.25 7.5,-7.9 -7.5,-7.9
Mechanical 8:
  region: 7.56,4.25 7.56,4.225 7.525,4.19 7.475,4.19 7.44,4.225 7.44,4.25 7.44,4.275 7.475,4.31 7.525,4.31 7.56,4.275 7.56,4.25
Mechanical 9:
  region: -4.6,4.01 -4.4,4.01 -4.4,2.21 -4.6,2.21
  region: -4.1,4.01 -3.9,4.01 -3.9,2.21 -4.1,2.21
  region: -3.6,4.01 -3.4,4.01 -3.4,2.21 -3.6,2.21
  region: -3.1,4.01 -2.9,4.01 -2.9,2.21 -3.1,2.21
  region: -2.6,4.01 -2.4,4.01 -2.4,2.21 -2.6,2.21
  region: -2.1,4.01 -1.9,4.01 -1.9,2.21 -2.1,2.21
  region: -1.6,4.01 -1.4,4.01 -1.4,2.21 -1.6,2.21
  region: -1.1,4.01 -0.9,4.01 -0.9,2.21 -1.1,2.21
  region: -0.6,4.01 -0.4,4.01 -0.4,2.21 -0.6,2.21
  region: -0.1,4.01 0.1,4.01 0.1,2.21 -0.1,2.21
  region: 0.4,4.01 0.6,4.01 0.6,2.21 0.4,2.21
  region: 0.9,4.01 1.1,4.01 1.1,2.21 0.9,2.21
  region: 1.4,4.01 1.6,4.01 1.6,2.21 1.4,2.21
  region: 1.9,4.01 2.1,4.01 2.1,2.21 1.9,2.21
  region: 2.4,4.01 2.6,4.01 2.6,2.21 2.4,2.21
  region: 2.9,4.01 3.1,4.01 3.1,2.21 2.9,2.21
  region: 3.4,4.01 3.6,4.01 3.6,2.21 3.4,2.21
  region: 3.9,4.01 4.1,4.01 4.1,2.21 3.9,2.21
  region: 4.4,4.01 4.6,4.01 4.6,2.21 4.4,2.21
  region: -7.5,3.6 -7,3.6 -7,1.6 -7.5,1.6
  region: 7,3.6 7.5,3.6 7.5,1.6 7,1.6
  region: 7,-2.86 7.5,-2.86 7.5,-3.86 7,-3.86
  region: -7.5,-2.86 -7,-2.86 -7,-3.86 -7.5,-3.86
3D body "C720616.step": height 6.16, standoff -2.16, extent -7.5,-8.099 7.5,3.801

## HDR-SMD_20P-P2.54-V-M-R2-C10-S2.54-LS7.5-EH [mm]
pads (20):
  rect 1.02x3.2 smd: 1(-11.43,-2.6) 2(-11.43,2.6) 3(-8.89,-2.6) 4(-8.89,2.6) 5(-6.35,-2.6) 6(-6.35,2.6) 7(-3.81,-2.6) 8(-3.81,2.6) 9(-1.27,-2.6) 10(-1.27,2.6) 11(1.27,-2.6) 12(1.27,2.6) 13(3.81,-2.6) 14(3.81,2.6) 15(6.35,-2.6) 16(6.35,2.6) 17(8.89,-2.6) 18(8.89,2.6) 19(11.43,-2.6) 20(11.43,2.6)
Top Overlay:
  lines w0.254: -12.061,-2.54 -12.87,-2.54 -12.87,2.54 -12.061,2.54 ; -10.799,-2.54 -9.521,-2.54 ; -10.799,2.54 -9.521,2.54 ; -8.259,-2.54 -6.981,-2.54 ; -8.259,2.54 -6.981,2.54 ; -5.719,-2.54 -4.441,-2.54 ; -5.719,2.54 -4.441,2.54 ; -3.179,-2.54 -1.901,-2.54 ; -3.179,2.54 -1.901,2.54 ; -0.639,-2.54 0.639,-2.54 ; -0.639,2.54 0.639,2.54 ; 1.901,-2.54 3.179,-2.54 ; 1.901,2.54 3.179,2.54 ; 4.441,-2.54 5.719,-2.54 ; 4.441,2.54 5.719,2.54 ; 6.981,-2.54 8.259,-2.54 ; 6.981,2.54 8.259,2.54 ; 9.521,-2.54 10.799,-2.54 ; 9.521,2.54 10.799,2.54 ; 12.061,-2.54 12.87,-2.54 12.87,2.54 12.061,2.54
Keep-Out Layer:
  board cut-out: -9.26,0 -9.26,-0.118 -9.321,-0.347 -9.44,-0.553 -9.607,-0.72 -9.813,-0.839 -10.042,-0.9 -10.278,-0.9 -10.507,-0.839 -10.713,-0.72 -10.88,-0.553 -10.999,-0.347 -11.06,-0.118 -11.06,0 -11.06,0.118 -10.999,0.347 -10.88,0.553 -10.713,0.72 -10.507,0.839 -10.278,0.9 -10.042,0.9 -9.813,0.839 -9.607,0.72 -9.44,0.553 -9.321,0.347 -9.26,0.118 -9.26,0
  board cut-out: 11.06,0 11.06,-0.118 10.999,-0.347 10.88,-0.553 10.713,-0.72 10.507,-0.839 10.278,-0.9 10.042,-0.9 9.813,-0.839 9.607,-0.72 9.44,-0.553 9.321,-0.347 9.26,-0.118 9.26,0 9.26,0.118 9.321,0.347 9.44,0.553 9.607,0.72 9.813,0.839 10.042,0.9 10.278,0.9 10.507,0.839 10.713,0.72 10.88,0.553 10.999,0.347 11.06,0.118 11.06,0
Keep-Out Layer:
  circle w0.003: c-10.16,0 r0.9
  circle w0.003: c10.16,0 r0.9
  region: -9.26,0 -9.26,-0.118 -9.321,-0.347 -9.44,-0.553 -9.607,-0.72 -9.813,-0.839 -10.042,-0.9 -10.278,-0.9 -10.507,-0.839 -10.713,-0.72 -10.88,-0.553 -10.999,-0.347 -11.06,-0.118 -11.06,0 -11.06,0.118 -10.999,0.347 -10.88,0.553 -10.713,0.72 -10.507,0.839 -10.278,0.9 -10.042,0.9 -9.813,0.839 -9.607,0.72 -9.44,0.553 -9.321,0.347 -9.26,0.118 -9.26,0
  region: -9.26,0 -9.27,-0.134 -9.3,-0.265 -9.349,-0.39 -9.416,-0.507 -9.5,-0.612 -9.599,-0.704 -9.71,-0.779 -9.831,-0.838 -9.96,-0.877 -10.093,-0.897 -10.227,-0.897 -10.36,-0.877 -10.489,-0.838 -10.61,-0.779 -10.721,-0.704 -10.82,-0.612 -10.904,-0.507 -10.971,-0.39 -11.02,-0.265 -11.05,-0.134 -11.06,0 -11.05,0.134 -11.02,0.265 -10.971,0.39 -10.904,0.507 -10.82,0.612 -10.721,0.704 -10.61,0.779 -10.489,0.838 -10.36,0.877 -10.227,0.897 -10.093,0.897 -9.96,0.877 -9.831,0.838 -9.71,0.779 -9.599,0.704 -9.5,0.612 -9.416,0.507 -9.349,0.39 -9.3,0.265 -9.27,0.134
  region: 11.06,0 11.06,-0.118 10.999,-0.347 10.88,-0.553 10.713,-0.72 10.507,-0.839 10.278,-0.9 10.042,-0.9 9.813,-0.839 9.607,-0.72 9.44,-0.553 9.321,-0.347 9.26,-0.118 9.26,0 9.26,0.118 9.321,0.347 9.44,0.553 9.607,0.72 9.813,0.839 10.042,0.9 10.278,0.9 10.507,0.839 10.713,0.72 10.88,0.553 10.999,0.347 11.06,0.118 11.06,0
  region: 11.06,0 11.05,-0.134 11.02,-0.265 10.971,-0.39 10.904,-0.507 10.82,-0.612 10.721,-0.704 10.61,-0.779 10.489,-0.838 10.36,-0.877 10.227,-0.897 10.093,-0.897 9.96,-0.877 9.831,-0.838 9.71,-0.779 9.599,-0.704 9.5,-0.612 9.416,-0.507 9.349,-0.39 9.3,-0.265 9.27,-0.134 9.26,0 9.27,0.134 9.3,0.265 9.349,0.39 9.416,0.507 9.5,0.612 9.599,0.704 9.71,0.779 9.831,0.838 9.96,0.877 10.093,0.897 10.227,0.897 10.36,0.877 10.489,0.838 10.61,0.779 10.721,0.704 10.82,0.612 10.904,0.507 10.971,0.39 11.02,0.265 11.05,0.134
Mechanical 1:
  circle w0.003: c-10.16,0 r0.9
  circle w0.003: c10.16,0 r0.9
Mechanical 6:
  circle w0.8: c10.16,0 r0.4
  circle w0.8: c-10.16,0 r0.4
Mechanical 7:
  lines w0.051: -12.7,-2.54 -12.7,2.46 12.7,2.46 12.7,-2.54 -12.7,-2.54
Mechanical 8:
  region: -12.64,-3.75 -12.64,-3.775 -12.675,-3.81 -12.725,-3.81 -12.76,-3.775 -12.76,-3.75 -12.76,-3.725 -12.725,-3.69 -12.675,-3.69 -12.64,-3.725 -12.64,-3.75
Mechanical 9:
  region: -11.75,-1.39 -11.11,-1.39 -11.11,-3.75 -11.75,-3.75
  region: -11.75,3.75 -11.11,3.75 -11.11,1.39 -11.75,1.39
  region: -9.21,-1.39 -8.57,-1.39 -8.57,-3.75 -9.21,-3.75
  region: -9.21,3.75 -8.57,3.75 -8.57,1.39 -9.21,1.39
  region: -6.67,-1.39 -6.03,-1.39 -6.03,-3.75 -6.67,-3.75
  region: -6.67,3.75 -6.03,3.75 -6.03,1.39 -6.67,1.39
  region: -4.13,-1.39 -3.49,-1.39 -3.49,-3.75 -4.13,-3.75
  region: -4.13,3.75 -3.49,3.75 -3.49,1.39 -4.13,1.39
  region: -1.59,-1.39 -0.95,-1.39 -0.95,-3.75 -1.59,-3.75
  region: -1.59,3.75 -0.95,3.75 -0.95,1.39 -1.59,1.39
  region: 0.95,-1.39 1.59,-1.39 1.59,-3.75 0.95,-3.75
  region: 0.95,3.75 1.59,3.75 1.59,1.39 0.95,1.39
  region: 3.49,-1.39 4.13,-1.39 4.13,-3.75 3.49,-3.75
  region: 3.49,3.75 4.13,3.75 4.13,1.39 3.49,1.39
  region: 6.03,-1.39 6.67,-1.39 6.67,-3.75 6.03,-3.75
  region: 6.03,3.75 6.67,3.75 6.67,1.39 6.03,1.39
  region: 8.57,-1.39 9.21,-1.39 9.21,-3.75 8.57,-3.75
  region: 8.57,3.75 9.21,3.75 9.21,1.39 8.57,1.39
  region: 11.11,3.75 11.75,3.75 11.75,1.39 11.11,1.39
  region: 11.11,-1.39 11.75,-1.39 11.75,-3.75 11.11,-3.75
3D body "C46061674.step": height 9.52, standoff -0.98, extent -12.7,-3.75 12.71,3.75